# Altium schematic symbol library Audio.SchLib: 4 symbols
Pins are listed as number, name and electrical type; pins without a type are passive.

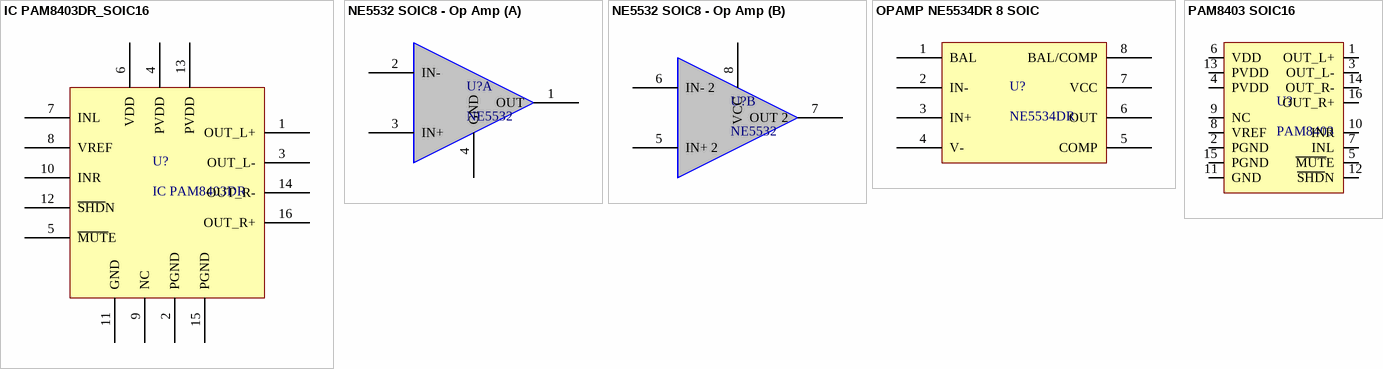
[diagram p0: symbols IC PAM8403DR_SOIC16 to PAM8403 SOIC16]

## IC PAM8403DR_SOIC16
designator U?, comment IC PAM8403DR
IC AMP AUDIO 3W CLASS D 16SOIC; Code: 5011-033
footprint SO_16 (SOP, SOIC, 3.9mm width, 1.27mm pitch,)
pins: 1 OUT_L+, 2 PGND, 3 OUT_L-, 4 PVDD, 5 ~{MUT}E, 6 VDD, 7 INL, 8 VREF, 9 NC, 10 INR, 11 GND, 12 ~{SHD}N, 13 PVDD, 14 OUT_R-, 15 PGND, 16 OUT_R+

## NE5532 SOIC8 - Op Amp
designator U?, comment NE5532
IC OPAMP GP 10MHZ 8SOIC; Code: 5003-003
footprint SO_8_W (SOIC Width, 5x5.3mm body 1.27mm pitch, 5.28mm SOIJ)
part A pins: 1  OUT, 2 IN-, 3 IN+, 4 GND
part B pins: 5 IN+ 2, 6 IN- 2, 7 OUT 2, 8 VCC

## OPAMP NE5534DR 8 SOIC
designator U?, comment NE5534DR
OPAMP NE5534DR 8 SOIC; Code: 5003-052
footprint SO_8_W (SOIC Width, 5x5.3mm body 1.27mm pitch, 5.28mm SOIJ)
footprint DIP_8 (DIP, pitch 2.54mm, 300mil Width)
pins: 1 BAL, 2 IN-, 3 IN+, 4 V-, 5 COMP, 6 OUT, 7 VCC, 8 BAL/COMP

## PAM8403 SOIC16
designator U?, comment PAM8403
FILTERLESS 3W CLASS-D STEREO AUDIO AMPLIFIER; Code: 5011-033
footprint SO_16 (SOP, SOIC, 3.9mm width, 1.27mm pitch,)
pins: 1 OUT_L+, 2 PGND, 3 OUT_L-, 4 PVDD, 5 ~{MUT}E, 6 VDD, 7 INL, 8 VREF, 9 NC, 10 INR, 11 GND, 12 ~{SHD}N, 13 PVDD, 14 OUT_R-, 15 PGND, 16 OUT_R+